# Altium footprint library Connectors.PcbLib: 228 footprints (part 13 of 15)
Each footprint in its own frame and in the unit in brackets; x right, y up, seen from the top. Pads: shape width x height; smd on the part's side, far side on the other; paste and mask are expansions set on the pad; w line width, h text height; cw(c..) or ccw(c..) is an arc to the next point about the centre after c.
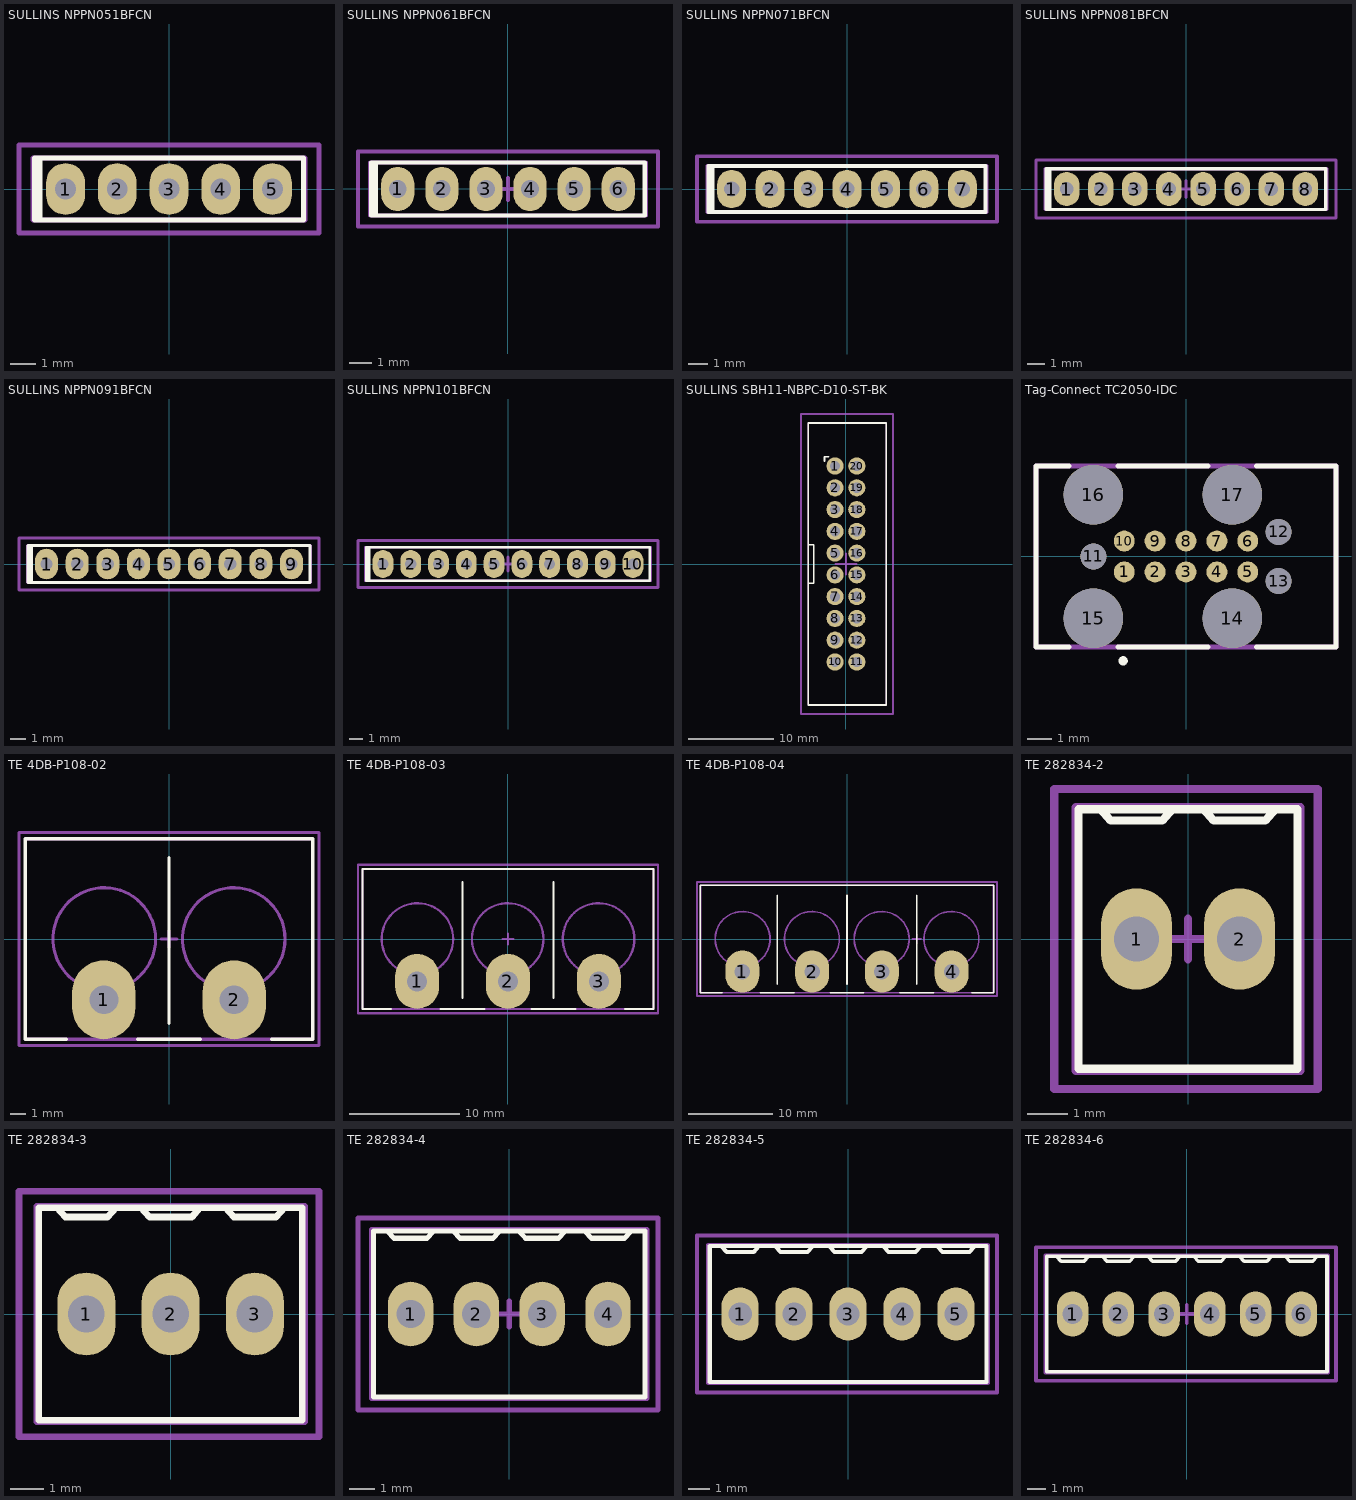
[diagram p12: the footprints below, top view; thin cyan lines are the x and y axes]

## SULLINS NPPN051BFCN [mm]
height 4.4
pads (5):
  oval 1.5x2 hole 0.8: 1(-4,0) 2(-2,0) 3(0,0) 4(2,0) 5(4,0)
Top Overlay:
  lines w0.2: -5,-1.2 -5,1.2 ; -5.2,-1.2 5.2,-1.2 5.2,1.2 -5.2,1.2 -5.2,-1.2
Board:
  lines w0.2: -5.25,-1.2 5.25,-1.2 5.25,1.2 -5.25,1.2 -5.25,-1.2
Top Courtyard:
  lines w0.2: -0.5,0 0.5,0 ; 0,-0.5 0,0.5 ; -5.8,-1.7 5.8,-1.7 5.8,1.7 -5.8,1.7 -5.8,-1.7
3D body "Sullins NPPN051BFCN-RC.STEP": height 4.41, standoff -2.39, extent -5.25,-1.2 5.25,1.2

## SULLINS NPPN061BFCN [mm]
height 4.4
pads (6):
  oval 1.5x2 hole 0.8: 1(-5,0) 2(-3,0) 3(-1,0) 4(1,0) 5(3,0) 6(5,0)
Top Overlay:
  lines w0.2: -6,-1.2 -6,1.2 ; -6.2,-1.2 -6.2,1.2 6.2,1.2 6.2,-1.2 -6.2,-1.2
Board:
  lines w0.2: -6.25,-1.2 -6.25,1.2 6.25,1.2 6.25,-1.2 -6.25,-1.2
Top Courtyard:
  lines w0.2: -0.5,0 0.5,0 ; 0,-0.5 0,0.5 ; -6.8,-1.7 -6.8,1.7 6.8,1.7 6.8,-1.7 -6.8,-1.7
3D body "Sullins NPPN061BFCN-RC.STEP": height 4.41, standoff -2.39, extent -6.25,-1.2 6.25,1.2

## SULLINS NPPN071BFCN [mm]
height 4.4
pads (7):
  oval 1.5x2 hole 0.8: 1(-6,0) 2(-4,0) 3(-2,0) 4(0,0) 5(2,0) 6(4,0) 7(6,0)
Top Overlay:
  lines w0.2: -7,-1.2 -7,1.2 ; -7.2,-1.2 7.2,-1.2 7.2,1.2 -7.2,1.2 -7.2,-1.2
Board:
  lines w0.2: -7.25,-1.2 7.25,-1.2 7.25,1.2 -7.25,1.2 -7.25,-1.2
Top Courtyard:
  lines w0.2: -0.5,0 0.5,0 ; 0,-0.5 0,0.5 ; -7.8,-1.7 7.8,-1.7 7.8,1.7 -7.8,1.7 -7.8,-1.7
3D body "Sullins NPPN071BFCN-RC.STEP": height 4.41, standoff -2.39, extent -7.25,-1.2 7.25,1.2

## SULLINS NPPN081BFCN [mm]
height 4.4
pads (8):
  oval 1.5x2 hole 0.8: 1(-7,0) 2(-5,0) 3(-3,0) 4(-1,0) 5(1,0) 6(3,0) 7(5,0) 8(7,0)
Top Overlay:
  lines w0.2: -8,-1.2 -8,1.2 ; -8.2,-1.2 8.2,-1.2 8.2,1.2 -8.2,1.2 -8.2,-1.2
Board:
  lines w0.2: -8.25,-1.2 8.25,-1.2 8.25,1.2 -8.25,1.2 -8.25,-1.2
Top Courtyard:
  lines w0.2: -0.5,0 0.5,0 ; 0,-0.5 0,0.5 ; -8.8,-1.7 8.8,-1.7 8.8,1.7 -8.8,1.7 -8.8,-1.7
3D body "Sullins NPPN081BFCN-RC.STEP": height 4.41, standoff -2.39, extent -8.25,-1.2 8.25,1.2

## SULLINS NPPN091BFCN [mm]
height 4.4
pads (9):
  oval 1.5x2 hole 0.8: 1(-8,0) 2(-6,0) 3(-4,0) 4(-2,0) 5(0,0) 6(2,0) 7(4,0) 8(6,0) 9(8,0)
Top Overlay:
  lines w0.2: -9,-1.2 -9,1.2 ; -9.2,-1.2 9.2,-1.2 9.2,1.2 -9.2,1.2 -9.2,-1.2
Board:
  lines w0.2: 9.25,-1.2 9.25,1.2 ; 9.25,-1.2 -9.25,-1.2 -9.25,1.2 9.25,1.2
Top Courtyard:
  lines w0.2: -0.5,0 0.5,0 ; 0,-0.5 0,0.5 ; -9.8,-1.7 9.8,-1.7 9.8,1.7 -9.8,1.7 -9.8,-1.7
3D body "Sullins NPPN091BFCN-RC.STEP": height 4.41, standoff -2.39, extent -9.25,-1.2 9.25,1.2

## SULLINS NPPN101BFCN [mm]
height 4.4
pads (10):
  oval 1.5x2 hole 0.8: 1(-9,0) 2(-7,0) 3(-5,0) 4(-3,0) 5(-1,0) 6(1,0) 7(3,0) 8(5,0) 9(7,0) 10(9,0)
Top Overlay:
  lines w0.2: -10,-1.2 -10,1.2 ; -10.2,-1.2 10.2,-1.2 10.2,1.2 -10.2,1.2 -10.2,-1.2
Board:
  lines w0.2: -10.25,-1.2 10.25,-1.2 10.25,1.2 -10.25,1.2 -10.25,-1.2
Top Courtyard:
  lines w0.2: -0.5,0 0.5,0 ; 0,-0.5 0,0.5 ; -10.8,-1.7 -10.8,1.7 10.8,1.7 10.8,-1.7 -10.8,-1.7
3D body "Sullins NPPN101BFCN-RC.STEP": height 4.41, standoff -2.39, extent -10.25,-1.2 10.25,1.2

## SULLINS SBH11-NBPC-D10-ST-BK [mm]
height 9.1
pads (20):
  round 2 hole 1.2: 1(-1.27,11.43) 2(-1.27,8.89) 3(-1.27,6.35) 4(-1.27,3.81) 5(-1.27,1.27) 6(-1.27,-1.27) 7(-1.27,-3.81) 8(-1.27,-6.35) 9(-1.27,-8.89) 10(-1.27,-11.43) 11(1.27,-11.43) 12(1.27,-8.89) 13(1.27,-6.35) 14(1.27,-3.81) 15(1.27,-1.27) 16(1.27,1.27) 17(1.27,3.81) 18(1.27,6.35) 19(1.27,8.89) 20(1.27,11.43)
Top Overlay:
  lines w0.2: -4.4,-2.25 -3.75,-2.25 -3.75,2.25 -4.4,2.25 ; -2.5,12 -2.5,12.5 -2,12.5 ; -4.4,-16.45 -4.4,16.45 4.7,16.45 4.7,-16.45 -4.4,-16.45
Board:
  lines w0.2: -4.4,-16.45 4.7,-16.45 4.7,16.45 -4.4,16.45 -4.4,-16.45
Top Courtyard:
  lines w0.2: -1.25,0 1.25,0 ; 0,-1.25 0,1.25 ; -5.25,-17.5 -5.25,17.5 5.5,17.5 5.5,-17.5 -5.25,-17.5
3D body "2x10 2.54mm Box Header.STEP": height 9.1, standoff -3, extent -4.4,-16.45 4.7,16.45

## Tag-Connect TC2050-IDC [mil] "10 pins pogo pin"
pads (17):
  round 34 smd: 1(-100,-25) 2(-50,-25) 3(0,-25) 4(50,-25) 5(100,-25) 6(100,25) 7(50,25) 8(0,25) 9(-50,25) 10(-100,25)
  round 42 hole 42 unplated: 11(-150,0) 12(150,39.96) 13(150,-39.96)
  round 96.5 hole 96.5 unplated: 14(75,-100) 15(-150,-100) 16(-150,100) 17(75,100)
Top Overlay:
  circle w7.87: c-101.85,-168.98 r3.58
  lines w7.87: -189.25,-146.75 -242.91,-146.75 -242.91,146.75 -189.25,146.75 ; -110.43,-146.75 35.43,-146.75 ; -110.43,146.75 35.43,146.75 ; 114.09,-146.75 242.91,-146.75 242.91,146.75 114.09,146.75
Top Component Outline:
  lines w7.87: -242.91,-146.75 242.91,-146.75 242.91,146.75 -242.91,146.75 -242.91,-146.75

## TE 4DB-P108-02 [mm] "Assembly, Dual Barrier 4DB P108"
height 13.5
pads (2):
  oval 4x5 hole 1.829: 1(-4.127,-3.85) 2(4.127,-3.85)
Top Overlay:
  lines w0.2: -6.5,-6.35 -9.1,-6.35 -9.1,6.35 9.1,6.35 9.1,-6.35 6.5,-6.35 ; -2,-6.35 2,-6.35 ; 0,-5.35 0,5.15
Board:
  circle w0.2: c-4.1,0 r3.25
  circle w0.2: c4.1,0 r3.25
  lines w0.2: -9.081,-6.35 9.081,-6.35 9.081,6.35 -9.081,6.35 -9.081,-6.35
Top Courtyard:
  lines w0.2: -0.5,0 0.5,0 ; 0,-0.5 0,0.5 ; -9.5,-6.75 -9.5,6.75 9.5,6.75 9.5,-6.75 -9.5,-6.75
3D body "TE 4DB-P108-02.STEP": height 14.48, standoff -4.06, extent -9.081,-6.35 9.081,6.35

## TE 4DB-P108-03 [mm] "Assembly, Dual Barrier 4DB P108"
height 13.5
pads (3):
  oval 4x5 hole 1.829: 1(-8.255,-3.85) 2(0,-3.85) 3(8.256,-3.85)
Top Overlay:
  lines w0.2: -10.627,-6.35 -13.227,-6.35 -13.227,6.35 13.228,6.35 13.228,-6.35 10.628,-6.35 ; -6.128,-6.35 -2.127,-6.35 ; -4.127,-5.35 -4.127,5.15 ; 2.128,-6.35 6.129,-6.35 ; 4.129,-5.35 4.129,5.15
Board:
  circle w0.2: c-0.028,0 r3.25
  circle w0.2: c-8.227,0 r3.25
  circle w0.2: c8.229,0 r3.25
  lines w0.2: -13.208,-6.35 -13.208,6.35 13.209,6.35 13.209,-6.35 -13.208,-6.35
Top Courtyard:
  lines w0.2: -0.499,0 0.5,0 ; 0.001,-0.5 0.001,0.5 ; -13.627,-6.75 13.628,-6.75 13.628,6.75 -13.627,6.75 -13.627,-6.75
3D body "TE 4DB-P108-03.STEP": height 14.47, standoff -4.06, extent -13.208,-6.35 13.208,6.35

## TE 4DB-P108-04 [mm] "Assembly, Dual Barrier 4DB P108"
height 13.5
pads (4):
  oval 4x5 hole 1.829: 1(-12.383,-3.85) 2(-4.127,-3.85) 3(4.127,-3.85) 4(12.383,-3.85)
Top Overlay:
  lines w0.2: -14.755,-6.35 -17.355,-6.35 -17.355,6.35 17.355,6.35 17.355,-6.35 14.755,-6.35 ; -10.255,-6.35 -6.255,-6.35 ; -8.255,-5.35 -8.255,5.15 ; -2,-6.35 2,-6.35 ; 0,-5.35 0,5.15 ; 6.255,-6.35 10.255,-6.35 ; 8.255,-5.35 8.255,5.15
Board:
  circle w0.2: c12.355,0 r3.25
  circle w0.2: c4.1,0 r3.25
  circle w0.2: c-4.155,0 r3.25
  circle w0.2: c-12.355,0 r3.25
  lines w0.2: -17.336,-6.35 17.336,-6.35 17.336,6.35 -17.336,6.35 -17.336,-6.35
Top Courtyard:
  lines w0.2: 7.755,0 8.755,0 ; 8.255,-0.5 8.255,0.5 ; -17.755,-6.75 -17.755,6.75 17.755,6.75 17.755,-6.75 -17.755,-6.75
3D body "TE 4DB-P108-04.STEP": height 14.47, standoff -4.06, extent -17.336,-6.35 17.335,6.35

## TE 282834-2 [mm]
height 10
pads (2):
  oval 1.75x2.5 hole 1.1: 1(-1.27,0) 2(1.27,0)
Top Overlay:
  lines w0.2: -2.159,3.2 -1.905,2.921 -0.635,2.921 -0.381,3.2 ; 0.381,3.2 0.635,2.921 1.905,2.921 2.159,3.2 ; -2.7,-3.2 -2.7,3.2 2.7,3.2 2.7,-3.2 -2.6,-3.2 -2.7,-3.2
Top Component Outline:
  lines w0.2: -2.77,-3.25 2.77,-3.25 2.77,3.25 -2.77,3.25 -2.77,-3.25
Top Courtyard:
  lines w0.2: -0.5,0 0.5,0 ; 0,-0.5 0,0.5 ; -3.3,-3.7 -3.3,-3.3 -3.3,3.7 3.2,3.7 3.2,-2.9 3.2,-3.7 -3.3,-3.7
3D body "TE Term Block 2port 282834-2-c-3d.STEP": height 10, standoff -3.4, extent -2.77,-3.25 2.77,3.25

## TE 282834-3 [mm]
height 10
pads (3):
  oval 1.75x2.5 hole 1.1: 1(-2.54,0) 2(0,0) 3(2.54,0)
Top Overlay:
  lines w0.2: -3.429,3.2 -3.175,2.921 -1.905,2.921 -1.651,3.2 ; -0.889,3.2 -0.635,2.921 0.635,2.921 0.889,3.2 ; 1.651,3.2 1.905,2.921 3.175,2.921 3.429,3.2 ; -3.97,-3.2 -3.97,3.2 3.97,3.2 3.97,-3.2 -3.87,-3.2 -3.97,-3.2
Top Component Outline:
  lines w0.2: -4.04,-3.25 4.04,-3.25 4.04,3.25 -4.04,3.25 -4.04,-3.25
Top Courtyard:
  lines w0.2: -0.5,0 0.5,0 ; 0,-0.5 0,0.5 ; -4.57,-3.7 -4.57,-3.3 -4.57,3.7 4.47,3.7 4.47,-2.9 4.47,-3.7 -4.57,-3.7
3D body "TE Term Block 3port 282834-3-c-3d.STEP": height 10, standoff -3.4, extent -4.04,-3.25 4.04,3.25

## TE 282834-4 [mm]
height 10
pads (4):
  oval 1.75x2.5 hole 1.1: 1(-3.81,0) 2(-1.27,0) 3(1.27,0) 4(3.81,0)
Top Overlay:
  lines w0.2: -4.699,3.2 -4.445,2.921 -3.175,2.921 -2.921,3.2 ; -2.159,3.2 -1.905,2.921 -0.635,2.921 -0.381,3.2 ; 0.381,3.2 0.635,2.921 1.905,2.921 2.159,3.2 ; 2.921,3.2 3.175,2.921 4.445,2.921 4.699,3.2 ; -5.24,-3.2 -5.24,3.2 5.24,3.2 5.24,-3.2 -5.14,-3.2 -5.24,-3.2
Top Component Outline:
  lines w0.2: -5.31,-3.25 5.31,-3.25 5.31,3.25 -5.31,3.25 -5.31,-3.25
Top Courtyard:
  lines w0.2: -0.5,0 0.5,0 ; 0,-0.5 0,0.5 ; -5.84,-3.7 -5.84,-3.3 -5.84,3.7 5.74,3.7 5.74,-2.9 5.74,-3.7 -5.84,-3.7
3D body "TE Term Block 4port 282834-4-c-3d.STEP": height 10, standoff -3.4, extent -5.31,-3.25 5.31,3.25

## TE 282834-5 [mm]
height 10
pads (5):
  oval 1.75x2.5 hole 1.1: 1(-5.08,0) 2(-2.54,0) 3(0,0) 4(2.54,0) 5(5.08,0)
Top Overlay:
  lines w0.2: -5.969,3.2 -5.715,2.921 -4.445,2.921 -4.191,3.2 ; -3.429,3.2 -3.175,2.921 -1.905,2.921 -1.651,3.2 ; -0.889,3.2 -0.635,2.921 0.635,2.921 0.889,3.2 ; 1.651,3.2 1.905,2.921 3.175,2.921 3.429,3.2 ; 4.191,3.2 4.445,2.921 5.715,2.921 5.969,3.2 ; -6.51,-3.2 -6.41,-3.2 6.51,-3.2 6.51,3.2 -6.51,3.2 -6.51,-3.2
Top Component Outline:
  lines w0.2: -6.58,-3.25 -6.58,3.25 6.58,3.25 6.58,-3.25 -6.58,-3.25
Top Courtyard:
  lines w0.2: -0.5,0 0.5,0 ; 0,-0.5 0,0.5 ; -7.11,-3.7 7.01,-3.7 7.01,-2.9 7.01,3.7 -7.11,3.7 -7.11,-3.3 -7.11,-3.7
3D body "TE Term Block 5port 282834-5-c-3d.STEP": height 10, standoff -3.4, extent -6.58,-3.25 6.58,3.25

## TE 282834-6 [mm]
height 10
pads (6):
  oval 1.75x2.5 hole 1.1: 1(-6.35,0) 2(-3.81,0) 3(-1.27,0) 4(1.27,0) 5(3.81,0) 6(6.35,0)
Top Overlay:
  lines w0.2: -7.239,3.2 -6.985,2.921 -5.715,2.921 -5.461,3.2 ; -4.699,3.2 -4.445,2.921 -3.175,2.921 -2.921,3.2 ; -2.159,3.2 -1.905,2.921 -0.635,2.921 -0.381,3.2 ; 0.381,3.2 0.635,2.921 1.905,2.921 2.159,3.2 ; 2.921,3.2 3.175,2.921 4.445,2.921 4.699,3.2 ; 5.461,3.2 5.715,2.921 6.985,2.921 7.239,3.2 ; -7.78,-3.2 -7.78,3.2 7.78,3.2 7.78,-3.2 -7.68,-3.2 -7.78,-3.2
Top Component Outline:
  lines w0.2: -7.85,-3.25 7.85,-3.25 7.85,3.25 -7.85,3.25 -7.85,-3.25
Top Courtyard:
  lines w0.2: -0.5,0 0.5,0 ; 0,-0.5 0,0.5 ; -8.38,-3.7 -8.38,-3.3 -8.38,3.7 8.28,3.7 8.28,-2.9 8.28,-3.7 -8.38,-3.7
3D body "TE Term Block 6port 282834-6-c-3d.STEP": height 10, standoff -3.4, extent -7.85,-3.25 7.85,3.25